# Altium schematic symbol library Sensors.SchLib: 9 symbols
Pins are listed as number, name and electrical type; pins without a type are passive.

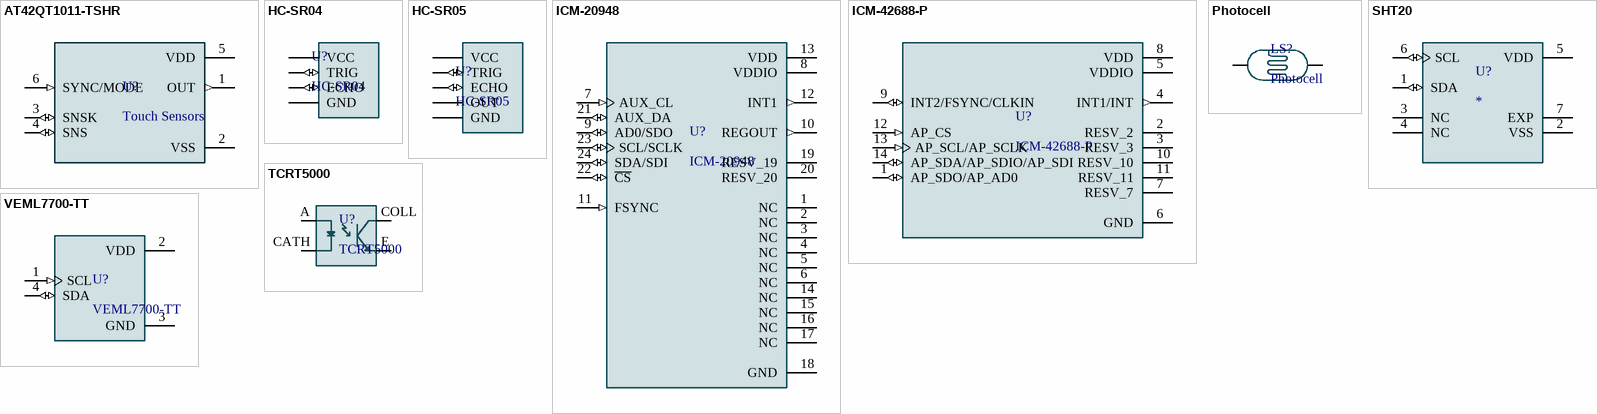
[diagram p0: symbols AT42QT1011-TSHR to VEML7700-TT]

## AT42QT1011-TSHR
designator U?, comment Touch Sensors
Capacitive Touch Buttons SOT-23-6; MF: Microchip; MP: AT42QT1011-TSHR; SnapEDA_Link: https://www.snapeda.com/parts/AT42QT1011-TSHR/Microchip/view-part/?ref=snap; Package: SOT-23-6 Atmel; Value: *; Check_prices: https://www.snapeda.com/parts/AT42QT1011-TSHR/Microchip/view-part/?ref=eda
footprint AT42QT1011-TSHR (SOT95P280X145-6N)
pins: 1 OUT (out), 2 VSS (power), 3 SNSK (io), 4 SNS (io), 5 VDD (power), 6 SYNC/MODE (in)

## HC-SR04
designator U?
Ultrasonic Sensor Module; Availability: Unavailable; MP: HC-SR04; Value: *; Price: None; Package: None
footprint HC-SR04
pins: 1 VCC (power), 2 TRIG (io), 3 ECHO (io), 4 GND (power)

## HC-SR05
designator U?
Ultrasonic Sensor Module; MP: HC-SR04; Availability: Unavailable; Value: *; Price: None; Package: None
footprint HC-SR05
pins: 1 VCC (power), 2 TRIG (io), 3 ECHO (io), 4 OUT (power), 5 GND (power)

## ICM-20948
designator U?
Accelerometer, Gyroscope, Magnetometer, 9 Axis Sensor I2C, SPI Output; MF: TDK InvenSense; SnapEDA_Link: https://www.snapeda.com/parts/ICM-20948/TDK/view-part/?ref=snap; Package: TFQFN-24 TDK InvenSense; Value: *; MP: ICM-20948; Check_prices: https://www.snapeda.com/parts/ICM-20948/TDK/view-part/?ref=eda
footprint ICM-20948 (QFN40P300X300X105-24N)
pins: 1 NC, 2 NC, 3 NC, 4 NC, 5 NC, 6 NC, 7 AUX_CL (in), 8 VDDIO (power), 9 AD0/SDO (io), 10 REGOUT (out), 11 FSYNC (in), 12 INT1 (out), 13 VDD (power), 14 NC, 15 NC, 16 NC, 17 NC, 18 GND (power), 19 RESV_19, 20 RESV_20, 21 AUX_DA (io), 22 ~{CS} (io), 23 SCL/SCLK (io), 24 SDA/SDI (io)

## ICM-42688-P
designator U?
Accelerometer, Gyroscope, 6 Axis Sensor Output; Package: None; MP: ICM-42688-P; Value: *; Availability: Unavailable; Price: None
footprint ICM-42688-P (PQFN50P300X250X97-14N)
pins: 1 AP_SDO/AP_AD0 (io), 2 RESV_2, 3 RESV_3, 4 INT1/INT (out), 5 VDDIO (power), 6 GND (power), 7 RESV_7, 8 VDD (power), 9 INT2/FSYNC/CLKIN (io), 10 RESV_10, 11 RESV_11, 12 AP_CS (in), 13 AP_SCL/AP_SCLK (in), 14 AP_SDA/AP_SDIO/AP_SDI (io)

## Photocell
designator LS?
Photocell Analog Output 2-Pin; MF: Advanced Photonix; Purchase-URL: https://pricing.snapeda.com/search/part/NSL-5162/?ref=eda; Value: *; SnapEDA_Link: https://www.snapeda.com/parts/NSL-5162/Advanced+Photonix/view-part/?ref=snap; Package: None; MP: NSL-5162; Check_prices: https://www.snapeda.com/parts/NSL-5162/Advanced+Photonix/view-part/?ref=eda; Price: None; Availability: In Stock
footprint Photocell
pins: 1, 2

## SHT20
designator U?
SENSOR HUMID/TEMP 3V I2C 3% SMD; MF: Sensirion AG; MP: SHT20; SnapEDA_Link: https://www.snapeda.com/parts/SHT20/Sensirion/view-part/?ref=snap; Package: DFN-6 Sensirion; Value: *; Check_prices: https://www.snapeda.com/parts/SHT20/Sensirion/view-part/?ref=eda
footprint SHT20
pins: 1 SDA (io), 2 VSS (power), 3 NC, 4 NC, 5 VDD (power), 6 SCL (io), 7 EXP

## TCRT5000
designator U?
950 nm 60 mA Through Hole Reflective Optical Sensor with Transistor Output; Availability: Unavailable; MP: TCRT5000; Value: *; Price: None; Package: None
footprint TCRT5000 (OPTO_TCRT5000)
pins: A, CATH, COLL, E

## VEML7700-TT
designator U?
Optical Sensor Ambient - IÂ²C 4-SMD, J-Lead; MF: Vishay Semiconductor; SnapEDA_Link: https://www.snapeda.com/parts/VEML7700-TT/Vishay/view-part/?ref=snap; Package: SMD-4 Vishay Semiconductor; Value: *; MP: VEML7700-TT; Check_prices: https://www.snapeda.com/parts/VEML7700-TT/Vishay/view-part/?ref=eda
footprint VEML7700-TT
pins: 1 SCL (in), 2 VDD (power), 3 GND (power), 4 SDA (io)